# Altium footprint library 排针.PcbLib: 86 footprints (part 1 of 6)
Each footprint in its own frame and in the unit in brackets; x right, y up, seen from the top. Pads: shape width x height; smd on the part's side, far side on the other; paste and mask are expansions set on the pad; w line width, h text height; cw(c..) or ccw(c..) is an arc to the next point about the centre after c.
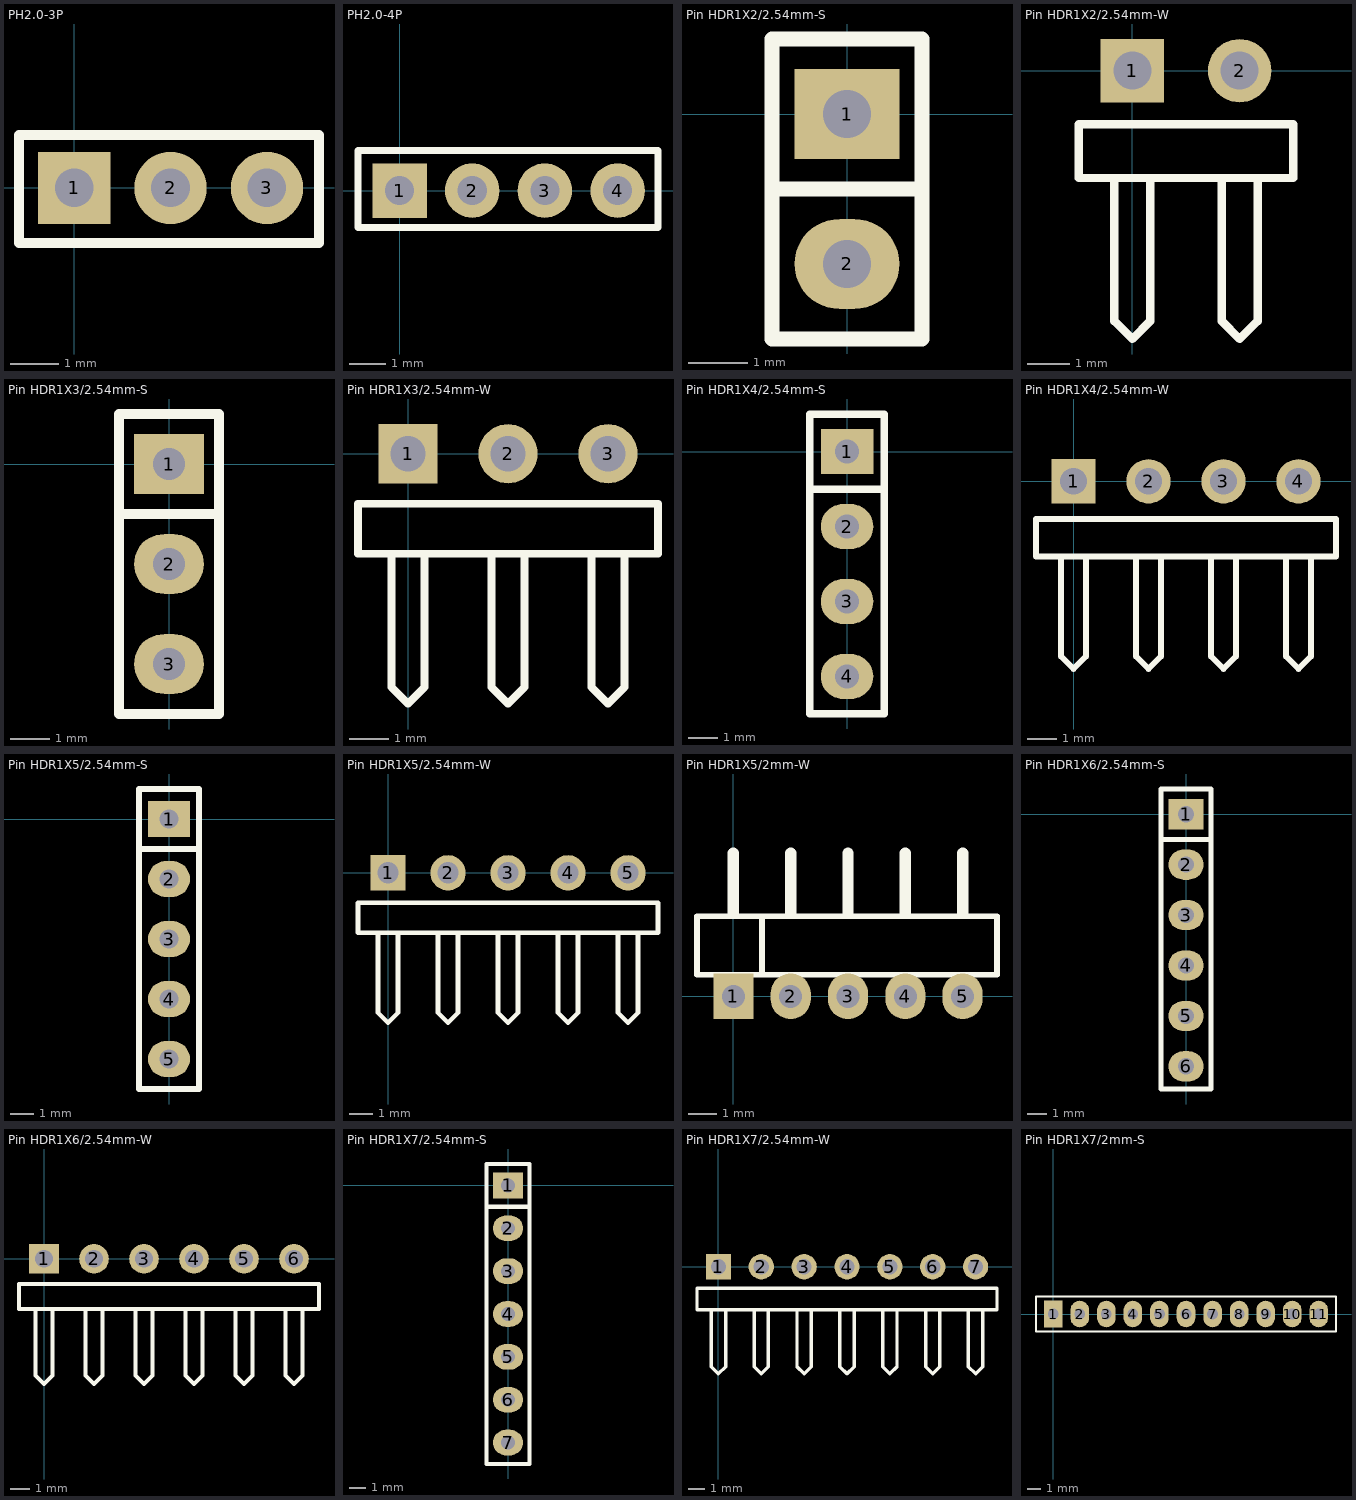
[diagram p0: the footprints below, top view; thin cyan lines are the x and y axes]

## PH2.0-3P [mm]
pads (3):
  rect 1.5x1.5 hole 0.8: 1(0,0)
  round 1.5 hole 0.8: 2(2,0) 3(4,0)
Top Overlay:
  lines w0.2: -1.143,-1.143 -1.143,1.1 ; 0.92,1.1 3.302,1.1 ; 5.08,-1.143 5.08,1.1
  lines w0.203: -1.143,-1.143 5.08,-1.143 ; -1.143,1.1 0.92,1.1 ; 3.302,1.1 5.08,1.1

## PH2.0-4P [mm]
pads (4):
  rect 1.5x1.5 hole 0.8: 1(0,0)
  round 1.5 hole 0.8: 2(2,0) 3(4,0) 4(6,0)
Top Overlay:
  lines w0.2: -1.143,1.1 -1.143,-1.016 7.112,-1.016 7.112,1.1 ; 0.92,1.1 4.984,1.1
  lines w0.203: -1.143,1.1 0.92,1.1 ; 4.984,1.1 7.112,1.1

## Pin HDR1X2/2.54mm-S [mil]
pads (2):
  rect 70x60 hole 32: 1(0,0)
  oval 70x60 hole 32: 2(0,-100)
Top Overlay:
  lines w10: -50,-50 50,-50 ; -50,-150 -50,50 50,50 50,-150 -50,-150
3D body "1001-2.STEP": height 336.22, standoff -118.11, extent -50,-150 50,50

## Pin HDR1X2/2.54mm-W [mm] "Connector; Header; 2 Position; Right Angle"
pads (2):
  rect 1.5x1.5 hole 0.9: 1(0,0)
  round 1.5 hole 0.9: 2(2.54,0)
Top Overlay:
  lines w0.2: -0.423,-2.54 -0.423,-5.927 0,-6.35 0.423,-5.927 0.423,-2.54 ; 2.117,-2.54 2.117,-5.927 2.54,-6.35 2.963,-5.927 2.963,-2.54 ; -1.27,-2.54 -1.27,-1.27 3.81,-1.27 3.81,-2.54 -1.27,-2.54
3D body "hdr2.stp": height 2.54, standoff -1, extent -1.27,-10.001 3.81,0.349

## Pin HDR1X3/2.54mm-S [mil]
pads (3):
  rect 70x60 hole 32: 1(0,0)
  oval 70x60 hole 32: 2(0,-100) 3(0,-200)
Top Overlay:
  lines w10: -50,-50 50,-50 ; -50,-250 -50,50 50,50 50,-250 -50,-250
Top Component Outline:
  lines w6: -50,-250 -50,50 50,50 50,-250 -50,-250
Top Component Center:
  lines w6: -25,-100 25,-100 ; 0,-125 0,-75
Top Value:
  text "'.Comment'" at 17.88,-264.84 h78.74
Top Designator:
  text "'.Designator'" at 16.47,-325.21 h78.74
3D body "1001-3.STEP": height 336.22, standoff -118.11, extent -50,-250 50,50

## Pin HDR1X3/2.54mm-W [mm] "Connector; Header; 3 Position; Right Angle"
pads (3):
  rect 1.5x1.5 hole 0.9: 1(0,0)
  round 1.5 hole 0.9: 2(2.54,0) 3(5.08,0)
Top Overlay:
  lines w0.2: -0.423,-2.54 -0.423,-5.927 0,-6.35 0.423,-5.927 0.423,-2.54 ; 2.117,-2.54 2.117,-5.927 2.54,-6.35 2.963,-5.927 2.963,-2.54 ; 4.657,-2.54 4.657,-5.927 5.08,-6.35 5.503,-5.927 5.503,-2.54 ; -1.27,-2.54 -1.27,-1.27 6.35,-1.27 6.35,-2.54 -1.27,-2.54
3D body "hdr3.stp": height 2.54, standoff -1, extent -1.27,-9.969 6.35,0.381

## Pin HDR1X4/2.54mm-S [mil]
pads (4):
  rect 70x60 hole 32: 1(0,0)
  oval 70x60 hole 32: 2(0,-100) 3(0,-200) 4(0,-300)
Top Overlay:
  lines w10: -50,-50 50,-50 ; -50,-350 50,-350 50,50 -50,50 -50,-350
3D body "1001-4.STEP": height 336.22, standoff -118.11, extent -49.99,-350 50.01,50

## Pin HDR1X4/2.54mm-W [mm] "Connector; Header; 4 Position; Right Angle"
pads (4):
  rect 1.5x1.5 hole 0.9: 1(0,0)
  round 1.5 hole 0.9: 2(2.54,0) 3(5.08,0) 4(7.62,0)
Top Overlay:
  lines w0.2: -0.423,-2.54 -0.423,-5.927 0,-6.35 0.423,-5.927 0.423,-2.54 ; 2.117,-2.54 2.117,-5.927 2.54,-6.35 2.963,-5.927 2.963,-2.54 ; 4.657,-2.54 4.657,-5.927 5.08,-6.35 5.503,-5.927 5.503,-2.54 ; 7.197,-2.54 7.197,-5.927 7.62,-6.35 8.043,-5.927 8.043,-2.54 ; -1.27,-2.54 -1.27,-1.27 8.89,-1.27 8.89,-2.54 -1.27,-2.54
3D body "hdr4.stp": height 2.54, standoff -1, extent -1.27,-10.001 8.89,0.349

## Pin HDR1X5/2.54mm-S [mil]
pads (5):
  rect 70x60 hole 32: 1(0,0)
  oval 70x60 hole 32: 2(0,-100) 3(0,-200) 4(0,-300) 5(0,-400)
Top Overlay:
  lines w10: -50,-50 50,-50 ; -50,-450 -50,50 50,50 50,-450 -50,-450
3D body "1001-5.STEP": height 336.22, standoff -118.11, extent -49.99,-450 50.01,50

## Pin HDR1X5/2.54mm-W [mm] "Connector; Header; 5 Position; Right Angle"
pads (5):
  rect 1.5x1.5 hole 0.9: 1(0,0)
  round 1.5 hole 0.9: 2(2.54,0) 3(5.08,0) 4(7.62,0) 5(10.16,0)
Top Overlay:
  lines w0.2: -0.423,-2.54 -0.423,-5.927 0,-6.35 0.423,-5.927 0.423,-2.54 ; 2.117,-2.54 2.117,-5.927 2.54,-6.35 2.963,-5.927 2.963,-2.54 ; 4.657,-2.54 4.657,-5.927 5.08,-6.35 5.503,-5.927 5.503,-2.54 ; 7.197,-2.54 7.197,-5.927 7.62,-6.35 8.043,-5.927 8.043,-2.54 ; 9.737,-2.54 9.737,-5.927 10.16,-6.35 10.583,-5.927 10.583,-2.54 ; -1.27,-2.54 -1.27,-1.27 11.43,-1.27 11.43,-2.54 -1.27,-2.54
3D body "hdr5.stp": height 2.54, standoff -1, extent -1.27,-9.969 11.43,0.381

## Pin HDR1X5/2mm-W [mm]
pads (5):
  rect 1.4x1.6 hole 0.8: 1(0,0)
  oval 1.4x1.6 hole 0.8: 2(2,0) 3(4,0) 4(6,0) 5(8,0)
Top Overlay:
  lines w0.2: 1,0.75 1,2.79 ; 9.2,0.75 -1.27,0.75 -1.27,2.79 9.2,2.79 9.2,0.755
  lines w0.4: 0,2.895 0,5 ; 2,2.895 2,5 ; 4,2.895 4,5 ; 6,2.895 6,5 ; 8,2.895 8,5
Bottom Overlay:
  lines w0.5: 1,-1 1,1 ; 3,-1 3,1 ; 5,-1 5,1 ; 7,-1 7,1
3D body "pin_header_a-sl200-ea-g05d.stp": height 2, standoff -2.8, extent -0.953,-0.323 8.997,6.927

## Pin HDR1X6/2.54mm-S [mil]
pads (6):
  rect 70x60 hole 32: 1(0,0)
  oval 70x60 hole 32: 2(0,-100) 3(0,-200) 4(0,-300) 5(0,-400) 6(0,-500)
Top Overlay:
  lines w10: -50,-50 50,-50 ; -50,-545 50,-545 50,50 -50,50 -50,-545
3D body "1001-6.STEP": height 336.22, standoff -118.11, extent -50,-545 50,55

## Pin HDR1X6/2.54mm-W [mm] "Connector; Header; 6 Position; Right Angle"
pads (6):
  rect 1.5x1.5 hole 0.9: 1(0,0)
  round 1.5 hole 0.9: 2(2.54,0) 3(5.08,0) 4(7.62,0) 5(10.16,0) 6(12.7,0)
Top Overlay:
  lines w0.2: -0.423,-2.54 -0.423,-5.927 0,-6.35 0.423,-5.927 0.423,-2.54 ; 2.117,-2.54 2.117,-5.927 2.54,-6.35 2.963,-5.927 2.963,-2.54 ; 4.657,-2.54 4.657,-5.927 5.08,-6.35 5.503,-5.927 5.503,-2.54 ; 7.197,-2.54 7.197,-5.927 7.62,-6.35 8.043,-5.927 8.043,-2.54 ; 9.737,-2.54 9.737,-5.927 10.16,-6.35 10.583,-5.927 10.583,-2.54 ; 12.277,-2.54 12.277,-5.927 12.7,-6.35 13.123,-5.927 13.123,-2.54 ; -1.27,-2.54 13.97,-2.54 13.97,-1.27 -1.27,-1.27 -1.27,-2.54
3D body "hdr6.stp": height 2.54, standoff -1, extent -1.27,-9.969 13.97,0.381

## Pin HDR1X7/2.54mm-S [mil]
pads (7):
  rect 70x60 hole 32: 1(0,0)
  oval 70x60 hole 32: 2(0,-100) 3(0,-200) 4(0,-300) 5(0,-400) 6(0,-500) 7(0,-600)
Top Overlay:
  lines w10: -50,-50 50,-50 ; -50,-650 -50,50 50,50 50,-650 -50,-650
3D body "1001-7.STEP": height 336.22, standoff -118.11, extent -49.99,-650 50.01,50

## Pin HDR1X7/2.54mm-W [mm] "Connector; Header; 7 Position; Right Angle"
pads (7):
  rect 1.5x1.5 hole 0.9: 1(0,0)
  round 1.5 hole 0.9: 2(2.54,0) 3(5.08,0) 4(7.62,0) 5(10.16,0) 6(12.7,0) 7(15.24,0)
Top Overlay:
  lines w0.2: -0.423,-2.54 -0.423,-5.927 0,-6.35 0.423,-5.927 0.423,-2.54 ; 2.117,-2.54 2.117,-5.927 2.54,-6.35 2.963,-5.927 2.963,-2.54 ; 4.657,-2.54 4.657,-5.927 5.08,-6.35 5.503,-5.927 5.503,-2.54 ; 7.197,-2.54 7.197,-5.927 7.62,-6.35 8.043,-5.927 8.043,-2.54 ; 9.737,-2.54 9.737,-5.927 10.16,-6.35 10.583,-5.927 10.583,-2.54 ; 12.277,-2.54 12.277,-5.927 12.7,-6.35 13.123,-5.927 13.123,-2.54 ; 14.817,-2.54 14.817,-5.927 15.24,-6.35 15.663,-5.927 15.663,-2.54 ; -1.27,-2.54 16.51,-2.54 16.51,-1.27 -1.27,-1.27 -1.27,-2.54
3D body "hdr7.stp": height 2.54, standoff -1, extent -1.27,-9.969 16.51,0.381

## Pin HDR1X7/2mm-S [mm]
pads (11):
  rect 1.4x2 hole 0.8: 1(0,0)
  oval 1.4x2 hole 0.8: 2(2,0) 3(4,0) 4(6,0) 5(8,0) 6(10,0) 7(12,0) 8(14,0) 9(16,0) 10(18,0) 11(20,0)
Top Overlay:
  lines w0.15: -1.3,-1.3 21.3,-1.3 21.3,1.3 -1.3,1.3 -1.3,-1.3
3D body "pin_header_a-sl200-eg-g11d.stp": height 6, standoff -2.8, extent -1.049,-0.889 20.901,1.111